# Altium schematic symbol library Main_Power_Uint_Sch_Library.SCHLIB: 55 symbols
Pins are listed as number, name and electrical type; pins without a type are passive.

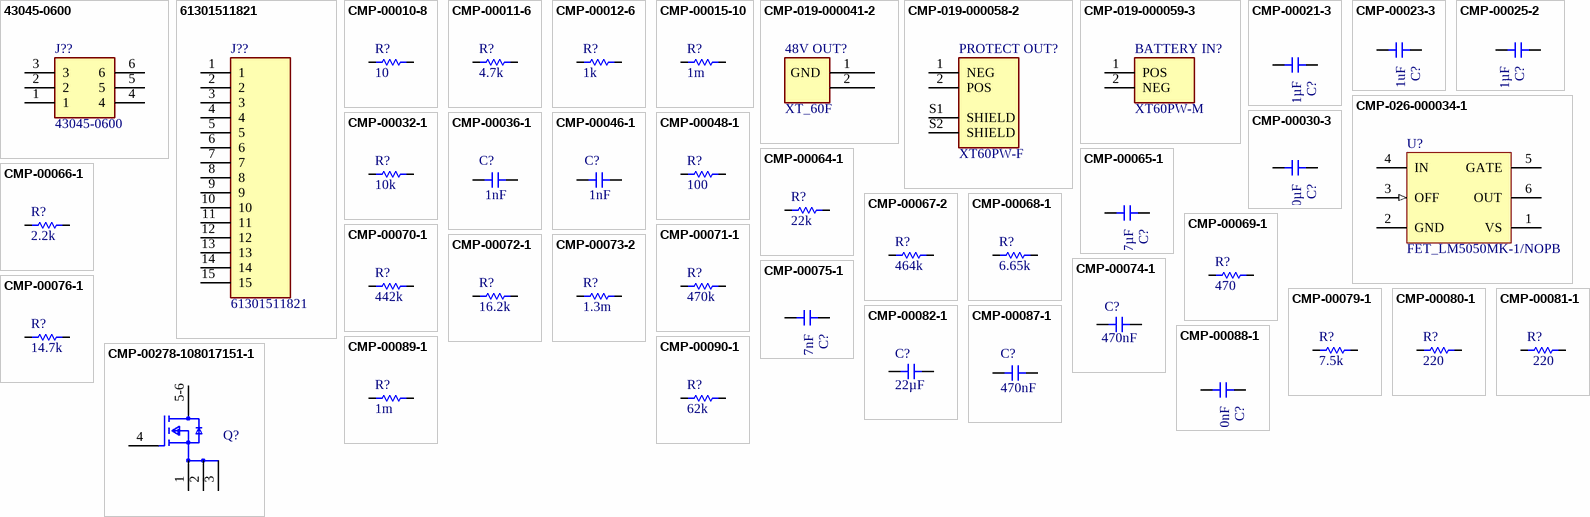
[diagram p0: symbols 43045-0600 to CMP-00278-108017151-1]

## 43045-0600
designator J??
Connector; Manufacturer_Name: Molex; Datasheet Link: https://www.molex.com/pdm_docs/sd/430450200_sd.pdf; Height: 9.9mm; Manufacturer_Part_Number: 43045-0600; Mouser Part Number: 538-43045-0600; Mouser Price/Stock: https://www.mouser.co.uk/ProductDetail/Molex/43045-0600?qs=mrPiglD9aYJ8CzJ%2FE2PNbw%3D%3D; Arrow Part Number: 43045-0600; Arrow Price/Stock: https://www.arrow.com/en/products/43045-0600/molex?region=nac
footprint 43045-06(00,01,02,10)
pins: 1, 2, 3, 4, 5, 6

## 61301511821
designator J??
Connector; Manufacturer_Name: Wurth Elektronik; Datasheet Link: https://www.we-online.com/catalog/datasheet/61301511821.pdf; Height: 8.65mm; Manufacturer_Part_Number: 61301511821
footprint 61301511821
pins: 1, 2, 3, 4, 5, 6, 7, 8, 9, 10, 11, 12, 13, 14, 15

## CMP-00010-8
designator R?, comment Resistance: 10  (hidden comment: R_0603_10R_1P_0P1W)
Chip resistor, 10 Ohm, 1%, 0.1W, 0603; Manufacturer: Yageo Group; Manufacturer Part Number: RC0603FR-0710RL; Power Rating: 100mW; Voltage Rating: 50V; Package: 0603; Mounting Type: SMD; Tolerance: 1%; Component Type: Resistors
footprint R0603
pins: 1, 2

## CMP-00011-6
designator R?, comment Resistance: 4.7k  (hidden comment: R_0603_4K7_1P_0P1W)
Chip resistor, 4.7k Ohm, 1%, 0.1W, 0603; Manufacturer: Yageo Group; Manufacturer Part Number: RC0603FR-074K7L; Power Rating: 100mW; Voltage Rating: 75V; Tolerance: 1%; Package: 0603; Mounting Type: SMD; Component Type: Resistors
footprint R0603
pins: 1, 2

## CMP-00012-6
designator R?, comment Resistance: 1k  (hidden comment: R_0603_1K_1P_0P1W)
Chip resistor, 1k Ohm, 1%, 0.1W, 0603; Manufacturer: Yageo Group; Manufacturer Part Number: RC0603FR-071KL; Power Rating: 100mW; Voltage Rating: 50V; Mounting Type: SMD; Package: 0603; Tolerance: 1%; Component Type: Resistors
footprint R0603
pins: 1, 2

## CMP-00015-10
designator R?, comment Resistance: 1m  (hidden comment: R_2512_1R_1P_5W)
Chip resistor, 1m Ohm, ±1%, 5W, 2512; Manufacturer: Bourns; Manufacturer Part Number: CSS2H-2512R-1L00F; Package: 2512; Power Rating: 5W; Tolerance: 1%; Mounting Type: SMD; Component Type: Resistors
footprint R2512
pins: 1, 2

## CMP-019-000041-2
designator 48V OUT?, comment XT_60F
XT_60 Connector FEMAIL; Design Item ID: XT_60F; Source: robit_connector.SchLib; System: Connector; Component Type: Connectors
footprint XT60_F
pins: 1 GND (power), 2

## CMP-019-000058-2
designator PROTECT OUT?, comment XT60PW-F
Socket DC Supply Connector Female; MF: AMASS; Price: None; Value: *; Package: Package; Check_prices: https://www.snapeda.com/parts/XT60PW-F/AMASS/view-part/?ref=eda; Design Item ID: XT60PW-F; SnapEDA_Link: https://www.snapeda.com/parts/XT60PW-F/AMASS/view-part/?ref=snap; MP: XT60PW-F; Availability: Not in stock; System: Connector; Source: robit_connector.SchLib; Component Type: Connectors
footprint XT60PW-F
pins: 1 NEG, 2 POS, S1 SHIELD, S2 SHIELD

## CMP-019-000059-3
designator BATTERY IN?, comment XT60PW-M
Socket, DC supply, male, PIN: 2; MF: AMASS; System: Connector; Package: Package; SnapEDA_Link: https://www.snapeda.com/parts/XT60PW-M/AMASS/view-part/?ref=snap; Design Item ID: XT60PW-M; Check_prices: https://www.snapeda.com/parts/XT60PW-M/AMASS/view-part/?ref=eda; MP: XT60PW-M; Price: None; Availability: Not in stock; Source: robit_connector.SchLib; Value: *; Manufacturer: Amass; Manufacturer Part Number: XT60PW-M; Component Type: Connectors
footprint XT60PW-M
pins: 1 POS, 2 NEG

## CMP-00021-3
designator C?, comment Capacitance: 0.1µF  (hidden comment: C_0603_0P1UF_10P_100V_X7R)
MLCC, 0.1µF, 10%, 100V, X7R, 0603; Manufacturer: Murata; Manufacturer Part Number: GRM188R72A104KA35D; Dielectric: X7R; Mounting Type: SMD; Tolerance: 10%; Package: 0603; Voltage Rating: 100V; Component Type: Capacitors
footprint C0603
pins: 1, 2

## CMP-00023-3
designator C?, comment Capacitance: 1uF  (hidden comment: C_1210_1UF_10P_100V_X7R)
MLCC, 1µF, 10%, 100V, X7R, 0603; Manufacturer: Murata; Manufacturer Part Number: GRM32ER72A105KA01L; Voltage Rating: 100V; Mounting Type: SMD; Package: 1210; Tolerance: 10%; Dielectric: X7R; Component Type: Capacitors
footprint C1210
pins: 1, 2

## CMP-00025-2
designator C?, comment Capacitance: 1µF  (hidden comment: C_0603_1UF_10P_25V_X7R)
MLCC, 1µF, 10%, 25V, X7R, 0603; Manufacturer: Murata; Manufacturer Part Number: GCM188R71E105KA64D; Dielectric: X7R; Tolerance: 10%; Voltage Rating: 25V; Package: 0603; Mounting Type: SMD; Component Type: Capacitors
footprint C0603
pins: 1, 2

## CMP-026-000034-1
designator U?, comment FET_LM5050MK-1/NOPB
5-V to 75-V 400-uA IQ ORing FET controller 6-SOT-23-THIN -40 to 125; Manufacturer: Texas Instruments; Manufacturer Part Number: LM5050MK-1/NOPB; Component Type: Diodes
footprint DDC0006A_N (SOT23, 6-Leads, Body 3.05x1.75mm, Pitch 0.95mm, IPC Medium Density)
footprint DDC0006A_M (SOT23, 6-Leads, Body 3.05x1.75mm, Pitch 0.95mm, IPC Low Density)
footprint DDC0006A_L (SOT23, 6-Leads, Body 3.05x1.75mm, Pitch 0.95mm, IPC High Density)
pins: 1 VS (power), 2 GND (power), 3 OFF (in), 4 IN (power), 5 GATE (power), 6 OUT

## CMP-00030-3
designator C?, comment Capacitance: 10µF  (hidden comment: C_1210_10UF_10P_100V_X7R)
MLCC, 10µF, 10%, 100V, X7R, 1210; Manufacturer: Murata; Manufacturer Part Number: GRM32EC72A106KE05L; Dielectric: X7S; Mounting Type: SMD; Tolerance: 10%; Package: 1210; Voltage Rating: 100V; Component Type: Capacitors
footprint C1210
pins: 1, 2

## CMP-00032-1
designator R?, comment Resistance: 10k  (hidden comment: R_0603_10K_1P_0P1W)
Chip resistor, 10k Ohm, 1%, 0.1W, 0603; Manufacturer: Panasonic; Manufacturer Part Number: ERJ-3EKF1002V; Power Rating: 100mW; Voltage Rating: 75V; Package: 0603; Mounting Type: SMD; Tolerance: 1%; Component Type: Resistors
footprint R0603
pins: 1, 2

## CMP-00036-1
designator C?, comment Capacitance: 1nF  (hidden comment: C_0603_1NF_10P_100V_X7R)
MLCC, 1nF, 10%, 100V, X7R, 0603; Manufacturer: TDK; Manufacturer Part Number: C1608X7R2A102K080AA; Package: 0603; Mounting Type: SMD; Dielectric: X7R; Tolerance: 10%; Voltage Rating: 100V; Component Type: Capacitors
footprint C0603
pins: 1, 2

## CMP-00046-1
designator C?, comment Capacitance: 1nF  (hidden comment: C_0603_1NF_10P_50V_X7R)
MLCC, 1nF, 10%, 50V, X7R, 0603; Manufacturer: Yageo Group; Manufacturer Part Number: C0603C102K5RACTU; Tolerance: 10%; Package: 0603; Dielectric: X7R; Voltage Rating: 50V; Mounting Type: SMD; Component Type: Capacitors
footprint C0603
pins: 1, 2

## CMP-00048-1
designator R?, comment Resistance: 100  (hidden comment: R_0603_100R_1P_0P1W)
Chip resistor, 100 Ohm, 1%, 0.1W, 0603; Manufacturer: Yageo Group; Manufacturer Part Number: RC0603FR-07100RL; Voltage Rating: 75V; Power Rating: 100mW; Tolerance: 1%; Mounting Type: SMD; Package: 0603; Component Type: Resistors
footprint R0603
pins: 1, 2

## CMP-00064-1
designator R?, comment Resistance: 22k  (hidden comment: R_0603_22K_1P_0P1W)
Chip resistor, 22k Ohm, 1%, 0.1W, 0603; Manufacturer: KOA Speer; Manufacturer Part Number: RK73H1JTTD2202F; Power Rating: 100mW; Voltage Rating: 75V; Tolerance: 1%; Mounting Type: SMD; Package: 0603; Component Type: Resistors
footprint R0603
pins: 1, 2

## CMP-00065-1
designator C?, comment Capacitance: 4.7µF  (hidden comment: C_1210_4U7F_10P_100V_X7R)
MLCC, 4.7µF, 10%, 100V, X7R, 1210; Manufacturer: Samsung Electro-Mechanics; Manufacturer Part Number: CL32B475KCVZW6E; Package: 1210; Tolerance: 10%; Dielectric: X7R; Voltage Rating: 100V; Mounting Type: SMD; Component Type: Capacitors
footprint C1210
pins: 1, 2

## CMP-00066-1
designator R?, comment Resistance: 2.2k  (hidden comment: R_2512_2R2K_1P_2W)
Chip resistor, 2.2k Ohm, ±1%, 2W, 2512; Manufacturer: Stackpole Electronics; Manufacturer Part Number: RHC2512FT2K20; Tolerance: 1%; Package: 2512; Mounting Type: SMD; Power Rating: 2W; Component Type: Resistors
footprint R2512
pins: 1, 2

## CMP-00067-2
designator R?, comment Resistance: 464k  (hidden comment: R_0603_464K_1P_0P1W)
Chip resistor, 464k Ohm, 1%, 0.1W, 0603; Manufacturer: Panasonic; Manufacturer Part Number: ERJ-3EKF4643V; Voltage Rating: 75V; Power Rating: 100mW; Mounting Type: SMD; Package: 0603; Tolerance: 1%; Component Type: Resistors
footprint R0603
pins: 1, 2

## CMP-00068-1
designator R?, comment Resistance: 6.65k  (hidden comment: R_0603_6R65K_1P_0P1W)
Chip resistor, 6.65k Ohm, 1%, 0.1W, 0603; Manufacturer: Yageo Group; Manufacturer Part Number: RC0603FR-076K65L; Power Rating: 100mW; Voltage Rating: 75V; Package: 0603; Mounting Type: SMD; Tolerance: 1%; Component Type: Resistors
footprint R0603
pins: 1, 2

## CMP-00069-1
designator R?, comment Resistance: 470  (hidden comment: R_0603_470R_1P_0P1W)
Chip resistor, 470 Ohm, 1%, 0.1W, 0603; Manufacturer: Panasonic; Manufacturer Part Number: ERJ-3EKF4700V; Voltage Rating: 75V; Power Rating: 100mW; Tolerance: 1%; Mounting Type: SMD; Package: 0603; Component Type: Resistors
footprint R0603
pins: 1, 2

## CMP-00070-1
designator R?, comment Resistance: 442k  (hidden comment: R_0603_442K_1P_0P1W)
Chip resistor, 442k Ohm, 1%, 0.1W, 0603; Manufacturer: Stackpole Electronics; Manufacturer Part Number: RMCF0603FT442K; Power Rating: 100mW; Voltage Rating: 75V; Mounting Type: SMD; Package: 0603; Tolerance: 1%; Component Type: Resistors
footprint R0603
pins: 1, 2

## CMP-00071-1
designator R?, comment Resistance: 470k  (hidden comment: R_0603_470K_1P_0P1W)
Chip resistor, 470k Ohm, 1%, 0.1W, 0603; Manufacturer: Stackpole Electronics; Manufacturer Part Number: RMCF0603FT470K; Power Rating: 100mW; Voltage Rating: 75V; Tolerance: 1%; Mounting Type: SMD; Package: 0603; Component Type: Resistors
footprint R0603
pins: 1, 2

## CMP-00072-1
designator R?, comment Resistance: 16.2k  (hidden comment: R_0603_16K2_0P1_0P1W)
Chip resistor, 16.2k Ohm, 0.1%, 0.1W, 0603; Manufacturer: Yageo Group; Manufacturer Part Number: RC0603FR-0716K2L; Voltage Rating: 75V; Tolerance: 1%; Power Rating: 100mW; Package: 0603; Mounting Type: SMD; Component Type: Resistors
footprint R0603
pins: 1, 2

## CMP-00073-2
designator R?, comment Resistance: 1.3m  (hidden comment: R_2512_1mR3_1P_3W)
Chip resistor, 1.3m Ohm, ±1%, 3W, 2512; Manufacturer: Vishay; Manufacturer Part Number: WSLF25121L300FEA; Tolerance: 1%; Mounting Type: SMD; Package: 2512; Power Rating: 3W; Component Type: Resistors
footprint R2512
pins: 1, 2

## CMP-00074-1
designator C?, comment Capacitance: 470nF  (hidden comment: C_0603_470NF_10P_50V_X7R)
MLCC, 470nF, 10%, 50V, X7R, 0603; Manufacturer: TAIYO YUDEN; Manufacturer Part Number: UMK107B7474KA-TR; Voltage Rating: 50V; Dielectric: X7R; Package: 0603; Tolerance: 10%; Mounting Type: SMD; Component Type: Capacitors
footprint C0603
simulation model UMK107B7474_A-TR
pins: 1, 2

## CMP-00075-1
designator C?, comment Capacitance: 47nF  (hidden comment: C_0603_47NF_10P_100V_X7R)
MLCC, 47nF, 10%, 100V, X7R, 0603; Manufacturer: Yageo Group; Manufacturer Part Number: C0603C473K1RACTU; Tolerance: 10%; Package: 0603; Mounting Type: SMD; Dielectric: X7R; Voltage Rating: 100V; Component Type: Capacitors
footprint C0603
simulation model UMK107B7474_A-TR
pins: 1, 2

## CMP-00076-1
designator R?, comment Resistance: 14.7k  (hidden comment: R_0603_14K7_0P1_0P1W)
Chip resistor, 14.7k Ohm, 0.1%, 0.1W, 0603; Manufacturer: Yageo Group; Manufacturer Part Number: RC0603FR-0714K7L; Voltage Rating: 75V; Power Rating: 100mW; Tolerance: 1%; Package: 0603; Mounting Type: SMD; Component Type: Resistors
footprint R0603
pins: 1, 2

## CMP-00079-1
designator R?, comment Resistance: 7.5k  (hidden comment: R_0603_7K5_1P_0P1W)
Chip resistor, 7.5k Ohm, 1%, 0.1W, 0603 / R509 -> 7.5k(다리, 124A), 6.2k(팔, 104A); Manufacturer: Yageo Group; Manufacturer Part Number: RC0603FR-077K5L; Voltage Rating: 75V; Power Rating: 100mW; Package: 0603; Mounting Type: SMD; Tolerance: 1%; Component Type: Resistors
footprint R0603
pins: 1, 2

## CMP-00080-1
designator R?, comment Resistance: 220  (hidden comment: R_0603_220R_1P_0P1W)
Chip resistor, 220 Ohm, 1%, 0.1W, 0603; Manufacturer: Yageo Group; Manufacturer Part Number: RC0603FR-07220RL; Voltage Rating: 75V; Power Rating: 100mW; Mounting Type: SMD; Tolerance: 1%; Package: 0603; Component Type: Resistors
footprint R0603
pins: 1, 2

## CMP-00081-1
designator R?, comment Resistance: 220  (hidden comment: R_2512_220R_1P_2W)
Chip resistor, 220 Ohm, ±1%, 2W, 2512; Manufacturer: Stackpole Electronics; Manufacturer Part Number: RHC2512FT220R; Power Rating: 2W; Tolerance: 1%; Package: 2512; Mounting Type: SMD; Component Type: Resistors
footprint R2512
pins: 1, 2

## CMP-00082-1
designator C?, comment Capacitance: 22µF  (hidden comment: C_0603_22UF_20P_10V_X7R)
MLCC, 22µF, 20%, 10V, X5R, 0603; Manufacturer: Murata; Manufacturer Part Number: GRM188R61A226ME15D; Tolerance: 20%; Package: 0603; Voltage Rating: 10V; Mounting Type: SMD; Dielectric: X5R; Component Type: Capacitors
footprint C0603
pins: 1, 2

## CMP-00087-1
designator C?, comment Capacitance: 470nF  (hidden comment: C_0805_470NF_10P_100V_C0G)
MLCC, 470nF, 10%, 100V, C0G, 0805; Manufacturer: KYOCERA AVX; Manufacturer Part Number: 08051C474K4Z2A; Dielectric: X7R; Tolerance: 10%; Mounting Type: SMD; Package: 0805; Voltage Rating: 100V; Component Type: Capacitors
footprint C0805
pins: 1, 2

## CMP-00088-1
designator C?, comment Capacitance: 220nF  (hidden comment: C_0603_220NF_10P_25V_X7R)
MLCC, 220nF, 10%, 25V, X7R, 0603; Manufacturer: Murata; Manufacturer Part Number: GRM188R71E224KA88D; Package: 0603; Voltage Rating: 25V; Dielectric: X7R; Mounting Type: SMD; Tolerance: 10%; Component Type: Capacitors
footprint C0603
simulation model UMK107B7474_A-TR
pins: 1, 2

## CMP-00089-1
designator R?, comment Resistance: 1m  (hidden comment: R_2512_1mR_1P_3W)
Chip resistor, 1m Ohm, ±1%, 3W, 2512; Manufacturer: Bourns; Manufacturer Part Number: CRE2512-FZ-R001E-3; Mounting Type: SMD; Package: 2512; Power Rating: 3W; Tolerance: 1%; Component Type: Resistors
footprint R2512
pins: 1, 2

## CMP-00090-1
designator R?, comment Resistance: 62k  (hidden comment: R_0603_66K_1P_0P1W)
Chip resistor, 66k Ohm, 1%, 0.1W, 0603 / R504 -> 62k(다리, 20A), 82k(팔, 15A); Manufacturer: Panasonic; Manufacturer Part Number: ERJ3EKF6202V; Power Rating: 100mW; Voltage Rating: 75V; Mounting Type: SMD; Tolerance: 1%; Package: 0603; Component Type: Resistors
footprint R0603
pins: 1, 2

## CMP-00278-108017151-1
designator Q?, comment NVMFS015N10MCLT1G  (value not drawn)
NVMFS015N10MCLT1G Mosfet, N-Ch, 100V, 47.1A, Dfn Rohs Compliant: Yes; Manufacturer Lifecycle Status: ACTIVE; NexarPartId: 108017151; Lifecycle Status: Production
footprint FP-488AA-MFG (Single P-Channel Power MOSFET, -60 V, -100 A, 7.7 mΩ)
pins: 1 S, 2 S, 3 S, 4 G, 5-6 D

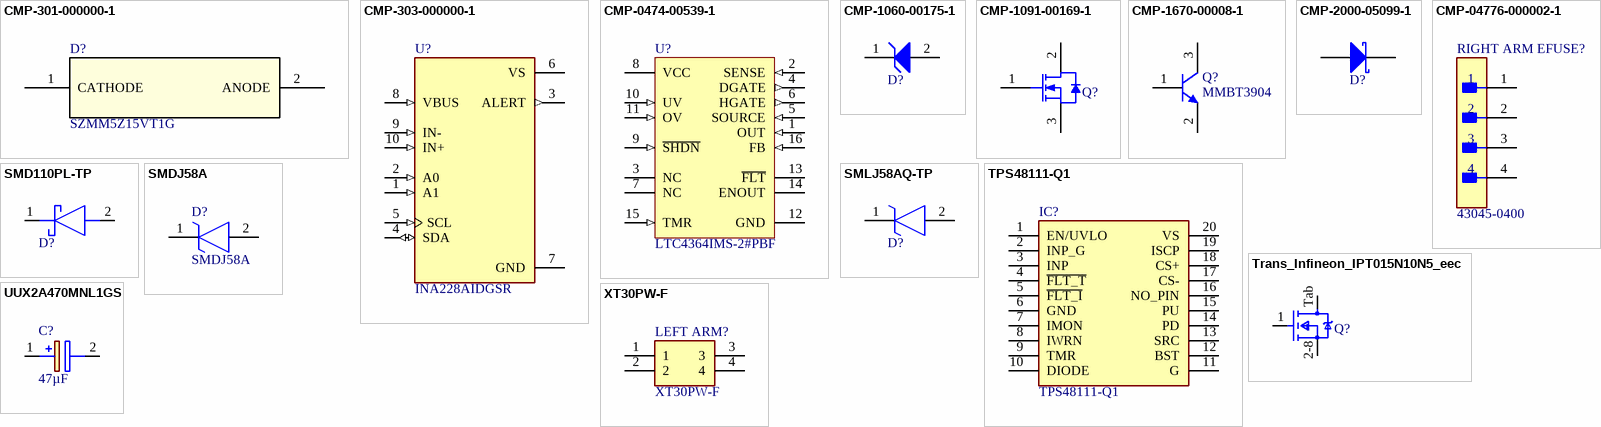
[diagram p1: symbols CMP-301-000000-1 to XT30PW-F]

## CMP-301-000000-1
designator D?, comment SZMM5Z15VT1G
Description; Manufacturer_Name: onsemi; RefDes: RefDes; Source: SZMM5Z15VT1G.SchLib; Copyright: Copyright (C) 2025 Ultra Librarian. All rights reserved.; Design Item ID: SZMM5Z15VT1G; Type: Type; Manufacturer_Part_Number: SZMM5Z15VT1G
footprint SOD-523_0P9X1P3_ONS
pins: 1 CATHODE, 2 ANODE

## CMP-303-000000-1
designator U?, comment INA228AIDGSR
85-V, 20-bit, ultra-precise, I2C output current/voltage/power/energy/charge monitor with alert; MF: Texas Instruments; Pin Count: 10; Check_prices: https://www.snapeda.com/parts/INA228AIDGSR/Texas+Instruments/view-part/?ref=eda; SnapEDA_Link: https://www.snapeda.com/parts/INA228AIDGSR/Texas+Instruments/view-part/?ref=snap; Source: INA228AIDGSR.SchLib; Component Type: Standard; Value: *; Design Item ID: INA228AIDGSR; MP: INA228AIDGSR; Package: VSSOP-10 Texas Instruments; Manufacturer: Texas Instruments; Manufacturer Part Number: INA228AIDGSR
footprint SOP50P490X110-10N
pins: 1 A1 (in), 2 A0 (in), 3 ALERT (out), 4 SDA (io), 5 SCL (in), 6 VS (power), 7 GND (power), 8 VBUS (in), 9 IN- (in), 10 IN+ (in)

## CMP-0474-00539-1
designator U?, comment LTC4364IMS-2#PBF
Surge Stopper with Ideal Diode, 4 to 80 V Vin, 16-pin SOP (MS-16), -40 to 85 degC, Pb-Free; Manufacturer: Linear Technology; Fast Comparator: no; Circuit Breaker Threshold: 50 mV; Circuit Breakers(#): 1; Active Limiting: yes; Vin Range: 4 to 80 V; Circuit Breaker Accuracy(%): 10; Extended Temp: C, I, H; ComponentLink1Description: Manufacturer URL; PackageReference: MS16; Mounting Technology: Surface Mount; RoHS: TRUE; PackageDescription: 16-Pin Plastic MSOP, Body 4.04 x 3.00 mm, Pitch 0.50 mm; ComponentLink3Description: Package Specification; PartNumber: LTC4364IMS-2#PBF; Power Good: no; ComponentLink2Description: Datasheet; ComponentLink2URL: http://cds.linear.com/docs/en/datasheet/436412f.pdf; ComponentLink1URL: http://www.linear.com/; ComponentLink3URL: http://cds.linear.com/docs/en/packaging/05081669_A_MS16.pdf; PackageVersion: Rev. Ã˜, 06/2010
footprint LT-MS-16_M (SOP, 16-Leads, Body 4.1x3.1mm, Pitch 0.5mm, IPC Low Density)
footprint LT-MS-16_L (SOP, 16-Leads, Body 4.1x3.1mm, Pitch 0.5mm, IPC High Density)
footprint LT-MS-16_N (SOP, 16-Leads, Body 4.1x3.1mm, Pitch 0.5mm, IPC Medium Density)
pins: 1 OUT (in) "Output Voltage Sense Input. This pin senses the voltage at the drain of the external N-channel MOSFET connected to the DGATE pin. The voltage difference between VCC and OUT sets the fault timer current. When this difference (See Datasheet)", 2 SENSE (in) "Current Sense Input. Connect this pin to the input side of the current sense resistor. The current limit circuit controls the HGATE pin to limit the sense voltage between the SENSE and OUT pins to 50mV if OUT is above 2.5V. (See Datasheet)", 3 NC, 4 DGATE (out) "Diode Controller Gate Drive Output. When the load current creates more than 30mV of drop across the MOSFET, the DGATE pin is pulled high by an internal charge pump current source and clamped to 12V above the SOURCE pin. When (See Datasheet)", 5 SOURCE (in) "Common Source Input and Gate Drive Return. Connect this pin directly to the sources of the external back-to-back N-channel MOSFETs. SOURCE is the anode of the ideal diode and the voltage sensed between this pin and the SENSE (See Datasheet)", 6 HGATE (out) "Surge Stopper Gate Drive Output. The HGATE pin is pulled up by an internal charge pump current source and clamped to 12V above the SOURCE pin. Both voltage and current amplifiers control the HGATE pin to regulate the output (See Datasheet)", 7 NC, 8 VCC (power) "Positive Supply Voltage Input. The positive supply input ranges from 4V to 80V for normal operation. It can also be pulled below ground potential by up to 40V during a reverse battery condition, without damaging the part. (See Datasheet)", 9 ~{SHDN} (in) "Shutdown Control Input. Pulling the S\H\D\N\ pin below 0.5V shuts off the LTC4364 and reduces the VCC pin current to 10uA. Pull this pin above 2.2V or disconnect it to allow the internal current source to turn the part back (See Datasheet)", 10 UV (in) "Undervoltage Comparator Input. When the UV pin falls below its 1.25V threshold, the HGATE pin is pulled down with a 1mA current. When the UV pin rises above 1.25V plus the hysteresis, the HGATE pin is pulled up by the (See Datasheet)", 11 OV (in) "Overvoltage Comparator Input. When OV is above its threshold of 1.25V, the fault retry function is inhibited. When OV falls below its threshold, the HGATE pin is allowed to turn back on when fault conditions are cleared. At (See Datasheet)", 12 GND (power) "Device Ground.", 13 ~{FLT} (hiz) "Fault Output. An open-drain output that pulls low after the TMR pin reaches the warning threshold of 1.25V. It indicates the pass device controlled by the HGATE pin is about to turn off because either the supply voltage has (See Datasheet)", 14 ENOUT (hiz) "Enable Output. An open-drain output that goes high impedance when the voltage at the OUT pin is above (VCC - 0.7V), indicating the external MOSFETs are fully on. The state of the pin is latched and resets when the OUT pin (See Datasheet)", 15 TMR (in) "Fault Timer Input. Connect a capacitor between this pin and ground to set the times for fault warning, fault turn-off, and cool down periods. Either voltage regulation or current regulation starts pulling up the TMR pin. The (See Datasheet)", 16 FB (in) "Voltage Regulator Feedback Input. Connect this pin to the resistive divider connected between the OUT pin and ground. During an overvoltage condition, the HGATE pin is controlled to maintain 1.25V at the FB pin. Connect to (See Datasheet)"

## CMP-1060-00175-1
designator D?, comment 1SMB5945BT3G  (value not drawn)
3 W Zener Voltage Regulator, 2-Pin SMB, Pb-Free, Tape and Reel; Manufacturer: On Semiconductor; VZ Typ (V): 68; ComponentLink3URL: http://www.onsemi.com/pub_link/Collateral/1SMB5913BT3-D.PDF; PackageReference: SMB-2-403A-03_H; PackageDescription: 2-Pin Small Molded Package, J-Bend Lead, Body 4.33 x 3.625 mm; PackageVersion: Rev. H, 05/2011; PartNumber: 1SMB5945BT3G; DatasheetVersion: Rev. 8; ComponentLink1Description: Manufacturer URL; ComponentLink1URL: http://www.onsemi.com/; RoHS: Pb-Free; ComponentLink2Description: Datasheet; Packing: Tape and Reel; ComponentLink2URL: http://www.onsemi.com/pub_link/Collateral/1SMB5913BT3-D.PDF; ComponentLink3Description: Package Specification; Mounting Technology: Surface Mount
footprint ONSC-SMB-2-403A-03_H_V (Molded, 2-Leads, Body 4.6x3.95mm)
pins: 1 K, 2 A

## CMP-1091-00169-1
designator Q?, comment IPD068N10N3 G  (value not drawn)
N-Channel OptiMOS 3 Power-Transistor, 100 V VDS, 90 A ID, -55 to 175 degC, PG-TO252-3-11, Reel, Green; Manufacturer: Infineon; QG: 51Â nC; RDS (on) (max): 6.8Â mOhm; RthJC (max): 1 K/W; VGS(th) (min): 2Â V; RthJA (max): 62 K/W; VDS (max): 100Â V; ID (max): 90Â A; Ptot (max): 150Â W; Green: TRUE; Polarity: N; VGS(th) (max): 3.5Â V; Rth: 1Â K/W; IDpuls (max): 360Â A; Packing: Reel; ComponentLink1Description: Manufacturer URL; Mounting Technology: Surface Mount; ComponentLink2Description: Datasheet; PartNumber: IPD068N10N3 G; ComponentLink2URL: http://www.infineon.com/dgdl/IPD068N10N3+G_Rev2.1.pdf?folderId=db3a304313b8b5a60113cee8763b02d7&fileId=db3a30431ce5fb52011d1eb7aeb615d1; DatasheetVersion: Rev. 2.1; ComponentLink3URL: http://www.infineon.com/dgdl/IPD160N04L_rev1.0.pdf?folderId=db3a3043163797a6011643468e7505a4&fileId=db3a3043163797a60116436401cf05cf; PackageReference: PG-TO252-3-11; PackageVersion: Rev. 02, 03/2007; ComponentLink1URL: http://www.infineon.com/; PackageDescription: 3-Pin Plastic (Green) Transistor Single Outline Package, 6.57 x 6.1 mm Body, 2.29 mm Pitch; ComponentLink3Description: Package Specification
footprint INF-PG-TO252-3-11_A_L (DPAK, 3-Leads, Body 6.57x6.1mm, Pitch 2.29mm, IPC High Density)
footprint INF-PG-TO252-3-11_A_M (DPAK, 3-Leads, Body 6.57x6.1mm, Pitch 2.29mm, IPC Low Density)
footprint INF-PG-TO252-3-11_A_N (DPAK, 3-Leads, Body 6.57x6.1mm, Pitch 2.29mm, IPC Medium Density)
pins: 1 GATE, 2 DRAIN, 3 SOURCE

## CMP-1670-00008-1
designator Q?, comment MMBT3904
NPN General Purpose Amplifier, 40 V, 0.2 A, -55 to 150 degC, 3-Pin SOT23, RoHS, Tape and Reel; Tolerance: 30ppm; Capacitance: 1.8E-11 f; Frequency: 12.288 MHz; ESR: 40 Ohm; Load Capacitance: 18 pF; REACH SVHC: No SVHC; Pins: 4; ComponentLink3URL: http://www.fairchildsemi.com/dwg/MA/MA03D.pdf; PackageDescription: 3-Pin Small Outline Transistor, Body 2.92 x 1.325 mm, Pitch 0.95 mm; ComponentLink1URL: https://www.fairchildsemi.com/; Max Operating Temperature: 70degC; PackageReference: SOT23-3; ComponentLink1Description: Manufacturer URL; Width: 0.126 inch; Min Operating Temperature: -20degC; DatasheetVersion: Rev. 1.1.0, 10/2014; Mount: Surface Mount; Height: 0.041 inch; Package Quantity: 1000; Frequency Tolerance: 30ppm; Packaging: Tape and Reel; ComponentLink2URL: https://www.fairchildsemi.com/datasheets/MM/MMBT3904.pdf; RoHSCompliant: True; ComponentLink3Description: Package Specification; ComponentLink2Description: Datasheet; Length: 0.197 inch
footprint FAIR-SOT23-3_V (SOT23, 3-Leads, Body 3.12x1.5mm, Pitch 0.95mm)
pins: 1 B, 2 E, 3 C

## CMP-2000-05099-1
designator D?, comment DFLS1100-7  (value not drawn)
1 A High Voltage Schottky Barrier Rectifier, 0.62 V, -55 to 175 degC, 2- Pin POWERDI123, Pb-Free, Tape and Reel; Manufacturer: Diodes Inc; Average Rectified Current-Max: 1A; Peak Current-Max: 40A; Forward Voltage: 0.77V; Reverse Current-Max: 1µA; Reverse Voltage-Max [Vrrm]: 100V; Datasheet Version: Sep-14; Datasheet URL: https://datasheet.ciiva.com/15144/getdatasheetpartid-44146-15144126.pdf; Manufacturer URL: http://www.diodes.com/
footprint DIOD-POWERDI123-2_V (SOD, 2-Leads, Body 2.8x1.78mm)
pins: 1 A, 2 K

## CMP-04776-000002-1
designator RIGHT ARM EFUSE?, comment 43045-0400
CONN HEADER R/A 4POS 3MM; Manufacturer: Molex; Conn Gender: Male; Conn Orientation: Right Angle; Voltage Rating: 600V; Number Of Contacts: 4; Is Female: yes; Current Rating: 8.5A; ComponentLink2URL: https://www.molex.com/webdocs/datasheets/pdf/en-us/0430450400_PCB_HEADERS.pdf; Manufacturer Part Number: 43045-0400; Digikey Description: CONN HEADER R/A 4POS 3MM; Category: Conn; Temperature Range High: +105°C; Lead Free: Yes; Device Class L1: Connectors; Automotive: No; Temperature: -40°C to +105°C; Footprint Url: https://www.molex.com/pdm_docs/sd/430450400_sd.pdf; Height: 9.27mm; Number Of Rows: 2; Device Class L3: unset; Pitch: 3mm; Temperature Range Low: -40°C; Contact Material: Tin,Nickel; Octopart: https://octopart.com/43045-0400-molex-287063; RoHS: TRUE; ComponentLink2Description: Datasheet; Package: 43045-0400; Device Class L2: Headers and Wire Housings
footprint FP-43045-0400-MFG
pins: 1, 2, 3, 4

## SMD110PL-TP
designator D?  (value not drawn)
Schottky Diode; Manufacturer_Name: MCC; Datasheet Link: https://www.mccsemi.com/pdf/Products/SMD15PL-SMD1200PL(SOD-123FL).pdf; Height: 1.35mm; Manufacturer_Part_Number: SMD110PL-TP; Mouser Part Number: 833-SMD110PL-TP; Mouser Price/Stock: https://www.mouser.co.uk/ProductDetail/Micro-Commercial-Components-MCC/SMD110PL-TP?qs=xjxbgUsuSIBtRX%252BtbqnRwQ%3D%3D; Arrow Part Number: SMD110PL-TP; Arrow Price/Stock: https://www.arrow.com/en/products/smd110pl-tp/micro-commercial-components?utm_currency=USD&region=europe
footprint SODFL3616X135N
pins: 1 K, 2 A

## SMDJ58A
designator D?
TVS Diode (Uni-directional); Manufacturer_Name: LITTELFUSE; Datasheet Link: https://mouser.componentsearchengine.com/Datasheets/2/SMDJ58A.pdf; Height: 2.62mm; Manufacturer_Part_Number: SMDJ58A; Mouser Part Number: 576-SMDJ58A; Mouser Price/Stock: https://www.mouser.co.uk/ProductDetail/Littelfuse/SMDJ58A?qs=zL8PTTxXkF2zAaoXCy3ytQ%3D%3D; Arrow Part Number: SMDJ58A; Arrow Price/Stock: https://www.arrow.com/en/products/smdj58a/littelfuse?utm_currency=USD&region=nac
footprint DIONM7959X262N
pins: 1 K, 2 A

## SMLJ58AQ-TP
designator D?  (value not drawn)
TVS Diode (Uni-directional); Manufacturer_Name: MCC; Datasheet Link: https://www.mccsemi.com/pdf/Products/SMLJ5.0AQ_SMLJ85CAQ(SMC).pdf; Height: 2.823mm; Manufacturer_Part_Number: SMLJ58AQ-TP
footprint DIOM7959X282N
pins: 1 K, 2 A

## TPS48111-Q1
designator IC?
Integrated Circuit; Manufacturer_Name: Texas Instruments; Datasheet Link: https://www.ti.com/lit/ds/slusee5c/slusee5c.pdf; Height: 1.1mm; Manufacturer_Part_Number: TPS48111-Q1
footprint SOP50P490X110-20N
pins: 1 EN/UVLO, 2 INP_G, 3 INP, 4 ~{FLT_T}, 5 ~{FLT_I}, 6 GND, 7 IMON, 8 IWRN, 9 TMR, 10 DIODE, 11 G, 12 BST, 13 SRC, 14 PD, 15 PU, 16 NO_PIN, 17 CS-, 18 CS+, 19 ISCP, 20 VS

## Trans_Infineon_IPT015N10N5_eec
designator Q?  (value not drawn)
TRANS MOSFET N-CH 100V 300A 8HSOF; Part Number: IPT015N10N5; helpURL: https://upverter.com/upn/revision/59ddb1136ed40b7f/; ComponentLink2Description: Datasheet; Temperature: -55°C to +175°C; Package: HSOF8; Supplier 2: Mouser; Supplier 1: Digi-Key; ComponentLink1URL: https://upverter.com/upn/revision/59ddb1136ed40b7f/; Supplier Part Number 2: 726-IPT015N10N5ATMA1; Supplier Part Number 1: IPT015N10N5ATMA1CT-ND; Manufacturer: Infineon; ComponentLink1Description: Upverter; ComponentLink2URL: http://www.infineon.com/dgdl/Infineon-IPT015N10N5-DS-v02_02-EN.pdf?fileId=5546d4624a75e5f1014ac94680661aff; RoHS: TRUE; Mouser Part Number: 726-IPT015N10N5ATMA1; Temperature Range High: +175°C; Digikey Description: TRANS MOSFET N-CH 100V 300A 8HSOF; Digikey Part Number: IPT015N10N5ATMA1CT-ND; Lead Free: yes; Temperature Range Low: -55°C
footprint Infineon_IPT015N10N5_0
pins: 1 Gate, 2-8 Source, Tab Drain

## UUX2A470MNL1GS
designator C?, comment 47µF
Capacitor Polarised; Manufacturer_Name: Nichicon; Manufacturer_Part_Number: UUX2A470MNL1GS; Datasheet Link: https://componentsearchengine.com/Datasheets/1/UUX2A470MNL1GS.pdf; Height: 10.5mm; Mouser Part Number: 647-UUX2A470MNL1GS; Mouser Price/Stock: https://www.mouser.co.uk/ProductDetail/Nichicon/UUX2A470MNL1GS?qs=jZZh9D7uMhmPZMofMKn2Fg%3D%3D; Arrow Part Number: UUX2A470MNL1GS; Arrow Price/Stock: https://www.arrow.com/en/products/uux2a470mnl1gs/nichicon?utm_currency=USD&region=nac
footprint CAPAE1030X1050N
pins: 1 +, 2 -

## XT30PW-F
designator LEFT ARM?
Connector; Manufacturer_Name: Amass; Datasheet Link: https://www.tme.eu/Document/ce4077e36b79046da520ca73227e15de/XT30PW%20SPEC.pdf; Height: 5mm; Manufacturer_Part_Number: XT30PW-F
footprint XT30PWF
pins: 1, 2, 3, 4